# Altium footprint library Resistor$.PcbLib: 99 footprints (part 1 of 7)
Each footprint in its own frame and in the unit in brackets; x right, y up, seen from the top. Pads: shape width x height; smd on the part's side, far side on the other; paste and mask are expansions set on the pad; w line width, h text height; cw(c..) or ccw(c..) is an arc to the next point about the centre after c.
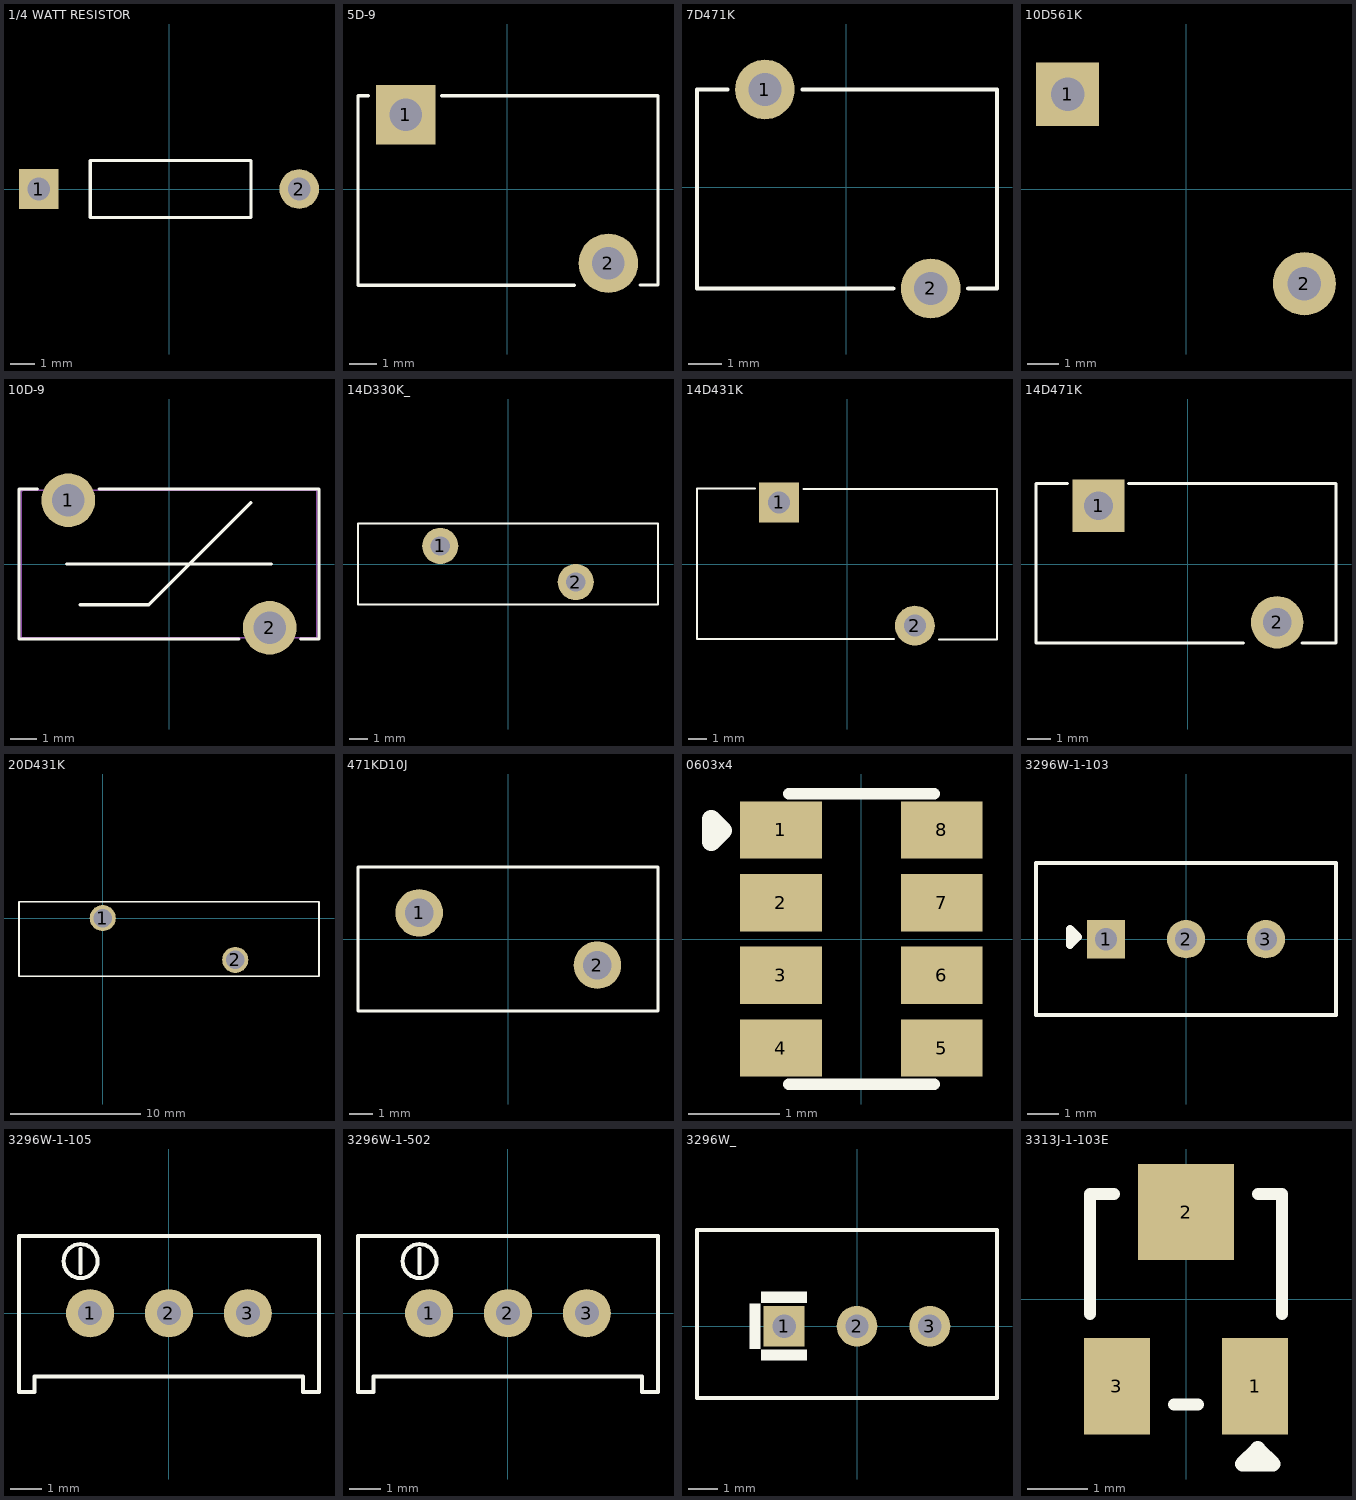
[diagram p0: the footprints below, top view; thin cyan lines are the x and y axes]

## 1/4 WATT RESISTOR [mm]
pads (2):
  rect 1.6x1.6 hole 0.914 paste-2539.97 mask+0.051: 1(-5.25,0)
  round 1.6 hole 0.914 paste-2539.97 mask+0.051: 2(5.25,0)
Top Overlay:
  lines w0.127: -3.175,-1.143 3.302,-1.143 3.302,1.143 -3.175,1.143 -3.175,-1.143
Mechanical 15:
  region: 5.52,0 5.519,0.053 5.477,0.15 5.401,0.225 5.303,0.265 5.197,0.265 5.099,0.225 5.023,0.15 4.981,0.053 4.98,0 4.981,-0.053 5.023,-0.15 5.099,-0.225 5.197,-0.265 5.303,-0.265 5.401,-0.225 5.477,-0.15 5.519,-0.053
3D body "C172965 (1).step": height 3.91, standoff -1.9, extent -5.475,-1.152 5.475,1.152

## 5D-9 [mm]
pads (2):
  rect 2.2x2.2 hole 1.2: 1(-3.75,2.75)
  round 2.2 hole 1.2: 2(3.75,-2.75)
Top Overlay:
  lines w0.127: -5.138,3.448 -5.521,3.448 -5.521,-3.563 2.48,-3.563 ; -2.413,3.454 5.588,3.454 5.588,-3.556 4.928,-3.556
3D body "5D-9.STEP": height 15.1, standoff -3.4, extent -5.475,-3.505 5.525,3.41

## 7D471K [mm]
pads (2):
  round 1.8 hole 1 paste-2539.97 mask+0.051: 1(-2.46,2.952) 2(2.54,-3.048)
Top Overlay:
  lines w0.127: -3.591,2.952 -4.507,2.952 -4.507,-3.048 1.409,-3.048 ; -1.329,2.952 4.54,2.952 4.54,-3.048 3.671,-3.048
3D body "7D471K (1).STEP": height 10, standoff -3.5, extent -4.428,-3.619 4.572,3.365

## 10D561K [mm]
pads (2):
  rect 2x2 hole 1.06: 1(-3.75,3)
  round 2 hole 1.06: 2(3.75,-3)

## 10D-9 [mm]
pads (2):
  round 2 hole 1.2 paste-2539.97 mask+0.051: 1(-3.75,2.375) 2(3.75,-2.375)
Top Overlay:
  lines w0.127: -4.907,2.794 -5.588,2.794 -5.588,-2.794 2.593,-2.794 ; -3.81,0 3.81,0 ; -3.302,-1.524 -0.762,-1.524 3.048,2.286 ; -2.593,2.794 5.588,2.794 5.588,-2.794 4.907,-2.794
Mechanical 15:
  region: -5.44,2.75 -5.44,2.775 -5.475,2.81 -5.525,2.81 -5.56,2.775 -5.56,2.75 -5.56,2.725 -5.525,2.69 -5.475,2.69 -5.44,2.725
  region: -3.375,2.375 -3.376,2.449 -3.433,2.586 -3.539,2.69 -3.676,2.747 -3.824,2.747 -3.961,2.69 -4.067,2.586 -4.124,2.449 -4.125,2.375 -4.124,2.301 -4.067,2.164 -3.961,2.06 -3.824,2.003 -3.676,2.003 -3.539,2.06 -3.433,2.164 -3.376,2.301
  region: 4.125,-2.375 4.125,-2.3 4.068,-2.163 3.962,-2.057 3.825,-2 3.675,-2 3.537,-2.057 3.432,-2.163 3.375,-2.3 3.375,-2.375 3.375,-2.45 3.432,-2.587 3.537,-2.693 3.675,-2.75 3.825,-2.75 3.962,-2.693 4.068,-2.587 4.125,-2.45
  lines w0.051: -5.5,-2.75 -5.5,2.75 5.5,2.75 5.5,-2.75 -5.5,-2.75
3D body "C2839611.step": height 15.1, standoff -3.4, extent -5.5,-3.455 5.5,3.455

## 14D330K_ [mm]
pads (2):
  round 2 hole 1.06: 1(-3.75,1) 2(3.75,-1)
Top Overlay:
  lines w0.127: 8.306,2.235 8.306,-2.246 -8.306,-2.246 -8.306,2.246 8.306,2.246
3D body "step_temp.STEP": height 20, standoff -20, extent -8.25,-2.2 8.25,2.2

## 14D431K [mm]
pads (2):
  rect 2.2x2.2 hole 1.2: 1(-3.75,3.4)
  round 2.2 hole 1.2: 2(3.75,-3.4)
Top Overlay:
  lines w0.127: -5.08,4.166 -8.28,4.166 -8.28,-4.14 2.591,-4.14 ; -2.388,4.14 8.28,4.14 8.28,-4.166 5.08,-4.166
3D body "14D431K.STEP": height 17.6, standoff -3.4, extent -8.245,-4.112 8.245,4.112

## 14D471K [mm]
pads (2):
  rect 2.2x2.2 hole 1.2: 1(-3.75,2.45)
  round 2.2 hole 1.2: 2(3.75,-2.45)
Top Overlay:
  lines w0.127: -5.055,3.378 -6.375,3.378 -6.375,-3.327 2.337,-3.327 ; -2.489,3.378 6.223,3.378 6.223,-3.327 4.801,-3.327
3D body "14D471K.STEP": height 13.85, standoff -2.9, extent -6.326,-3.277 6.174,3.327

## 20D431K [mm]
pads (2):
  round 2 hole 1.4: 1(0,0) 2(10.16,-3.2)
Top Overlay:
  lines w0.127: -6.42,-4.45 16.58,-4.45 16.58,1.25 -6.42,1.25 -6.42,-4.45

## 471KD10J [mm]
pads (2):
  round 2 hole 1.2 paste-2539.97 mask+0.051: 1(-3.749,1.1) 2(3.749,-1.1)
Top Overlay:
  lines w0.127: -6.325,-3.023 -6.325,3.023 6.299,3.023 6.299,-3.023 -6.325,-3.023
3D body "C522648.step": height 13.75, standoff -3.5, extent -6.25,-2.95 6.248,2.95

## 0603x4 [mm]
pads (8):
  rect 0.9x0.63 smd: 1(-0.885,1.2) 2(-0.885,0.4) 3(-0.885,-0.4) 4(-0.885,-1.2) 5(0.885,-1.2) 6(0.885,-0.4) 7(0.885,0.4) 8(0.885,1.2)
Top Overlay:
  lines w0.127: -0.8,-1.6 0.8,-1.6 ; -0.8,1.6 0.8,1.6
  lines w0.2: -1.651,1.067 -1.524,1.194 -1.651,1.321 -1.651,1.067
3D body "TC164-JR-070RL.step": height 0.7, standoff 0, extent -0.8,-1.6 0.8,1.6

## 3296W-1-103 [mm]
pads (3):
  rect 1.218x1.218 hole 0.71: 1(-2.54,0)
  round 1.218 hole 0.71: 2(0,0) 3(2.54,0)
Top Overlay:
  lines w0.127: -4.765,-2.41 4.765,-2.41 4.765,2.42 -4.765,2.42 -4.765,-2.41
  lines w0.254: -3.683,-0.178 -3.429,0.076 -3.683,0.33 -3.683,-0.178
3D body "step_temp.STEP": height 11.55, standoff -7.72, extent -4.765,-2.41 4.765,2.42

## 3296W-1-105 [mil]
pads (3):
  round 60 hole 30 paste-99999 mask+2: 1(-98.42,0) 2(0,0) 3(98.42,0)
Top Overlay:
  lines w5: -110.39,50 -110.39,65 ; -110.4,86.2 ccw(c-110.19,64.99) -109.99,86.2 ; 187.01,96.46 -187.01,96.46 -187.01,-96.46 -187.01,-98.42 -167.52,-98.42 -167.52,-78.74 167.52,-78.74 167.52,-98.42 187.22,-98.42 187.22,-96.46 187.22,96.46 ; -110.39,65 -110.39,80 -110.39,65
3D body "3296W.stp": height 453.7, standoff -253.3, extent -187.5,-95 187.5,95

## 3296W-1-502 [mil]
pads (3):
  round 60 hole 30 paste-99999 mask+2: 1(-98.42,0) 2(0,0) 3(98.42,0)
Top Overlay:
  lines w5: -110.39,50 -110.39,65 ; -110.4,86.2 ccw(c-110.19,64.99) -109.99,86.2 ; 187.01,96.46 -187.01,96.46 -187.01,-96.46 -187.01,-98.42 -167.52,-98.42 -167.52,-78.74 167.52,-78.74 167.52,-98.42 187.22,-98.42 187.22,-96.46 187.22,96.46 ; -110.39,65 -110.39,80 -110.39,65
3D body "C118907.step": height 452.76, standoff -137.79, extent -187.01,-94.49 187.01,96.46

## 3296W_ [mm]
pads (3):
  rect 1.4x1.4 hole 0.8: 1(-2.5,0)
  round 1.4 hole 0.8: 2(0,0) 3(2.5,0)
Top Overlay:
  region: -1.713,-1.183 -1.713,-0.802 -3.287,-0.802 -3.287,-1.183
  region: -3.287,1.183 -3.287,0.802 -1.713,0.802 -1.713,1.183
  rectangle: -3.683,-0.787 -3.302,0.787
  lines w0.127: -5.486,-2.464 -5.486,3.302 4.801,3.302 4.801,-2.464 -5.486,-2.464
3D body "3926w.STEP": height 18.03, standoff -6.97, extent -5.465,-2.41 4.765,3.266

## 3313J-1-103E [mm]
pads (3):
  rect 1.1x1.6 smd paste+0: 1(1.15,-1.45) 3(-1.15,-1.45)
  rect 1.6x1.6 smd paste+0: 2(0,1.45)
Top Overlay:
  lines w0.2: -1.6,-0.25 -1.6,1.75 -1.2,1.75 ; -0.2,-1.75 0.2,-1.75 ; 1.2,1.75 1.6,1.75 1.6,-0.25
  lines w0.254: 0.94,-2.743 1.448,-2.743 1.194,-2.489 0.94,-2.743
3D body "3313J-001.stp": height 2.11, standoff -0.03, extent -1.651,-1.753 1.651,1.753